# Altium schematic symbol library BOARD_ADS _V2.0 (1).SchLib: 12 symbols
Pins are listed as number, name and electrical type; pins without a type are passive.

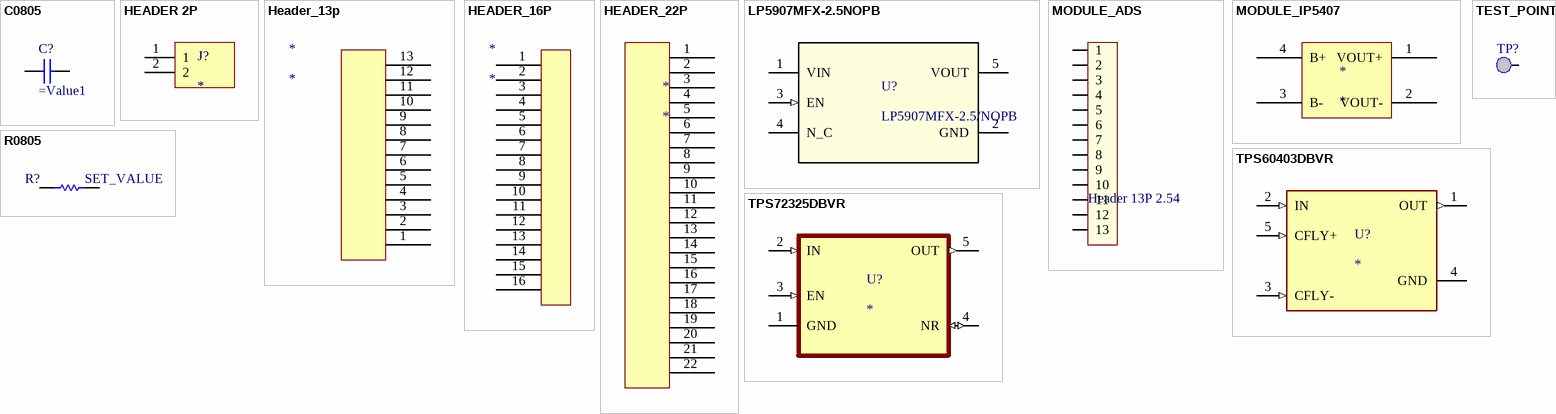
[diagram p0: symbols C0805 to TPS72325DBVR]

## C0805
designator C?
CAP 0402 MLCC NON-POLARIZED GENERIC; VALUE TOLERANCE VOLTAGE AND MPN SET ON INSTANCE; Type: Capacitor; Value2: SET_VOLTAGE; Case: 0402; Package: 0402
footprint C0805L
pins: 1, 2

## HEADER 2P
designator J?
HEADER ASSEMBLY, NARROW, MTA-100, 2 POSITION, STRAIGHT | TE Connectivity 3-644456-2; SnapEDA_Link: https://www.snapeda.com/parts/3-644456-2/TE+Connectivity+AMP+Connectors/view-part/?ref=snap; Package: None; Value: *; MF: TE Connectivity; MP: 3-644456-2; Check_prices: https://www.snapeda.com/parts/3-644456-2/TE+Connectivity+AMP+Connectors/view-part/?ref=eda
footprint HEADER_2P
pins: 1, 2

## Header_13p
designator *
footprint HEADER_13P
pins: 1, 2, 3, 4, 5, 6, 7, 8, 9, 10, 11, 12, 13

## HEADER_16P
designator *
footprint header 16p
pins: 1, 2, 3, 4, 5, 6, 7, 8, 9, 10, 11, 12, 13, 14, 15, 16

## HEADER_22P
designator *
footprint header_22p
pins: 1, 2, 3, 4, 5, 6, 7, 8, 9, 10, 11, 12, 13, 14, 15, 16, 17, 18, 19, 20, 21, 22

## LP5907MFX-2.5NOPB
designator U?, comment LP5907MFX-2.5/NOPB
250-mA, low-noise, high-PSRR, ultra-low-dropout voltage regulator with low IQ and enable 5-SOT-23 -40 to 125; Manufacturer_Name: Texas Instruments; TYPE: TYPE; RefDes: RefDes; Copyright: Copyright (C) 2026 Ultra Librarian. All rights reserved.; Manufacturer_Part_Number: LP5907MFX-2.5/NOPB
footprint DBV0005A_M
pins: 1 VIN (power), 2 GND (power), 3 EN (in), 4 N_C, 5 VOUT (power)

## MODULE_ADS
designator H??, comment Header 13P 2.54
Cắm; Ten_Linh_Kien: Header 10P XH2.54-10P Đực Cong; Don_Vi: Con; Ma_Hang: MH007094; Chung_Loai: Cắm
footprint MODULE ADS1299
pins: 1, 2, 3, 4, 5, 6, 7, 8, 9, 10, 11, 12, 13

## MODULE_IP5407
designator *
footprint MODULE_IP5407
pins: 1 VOUT+, 2 VOUT-, 3 B-, 4 B+

## R0805
designator R?, comment SET_VALUE
RES 0805 GENERIC; VALUE TOLERANCE POWER AND MPN SET ON INSTANCE; Value1: SET_VALUE; Case: 0805; Type: Resistor; Package: 0805
footprint R0805
pins: 1, 2

## TEST_POINT
designator TP?, comment TP_?  (value not drawn)
TP SMD 1P PadDia_1.50mm ROUND COPPER TEST POINT
footprint TP_SMD_1P50 (Single 1.50 mm round top-layer copper test point for probing)
pins: 1 TP

## TPS60403DBVR
designator U?
60mA Charge Pump Voltage Inverter with Fixed 250kHz Operation; MF: Texas Instruments; MP: TPS60403DBVR; SnapEDA_Link: https://www.snapeda.com/parts/TPS60403DBVR/Texas+Instruments/view-part/?ref=snap; Package: SOT-23-5 Texas Instruments; Value: *; Check_prices: https://www.snapeda.com/parts/TPS60403DBVR/Texas+Instruments/view-part/?ref=eda
footprint SOT95P280X145-5N
pins: 1 OUT (out), 2 IN (in), 3 CFLY- (in), 4 GND (power), 5 CFLY+ (in)

## TPS72325DBVR
designator U?
200-mA, negative, adjustable low-dropout voltage regulator with enable; MF: Texas Instruments; MP: TPS72325DBVR; SnapEDA_Link: https://www.snapeda.com/parts/TPS72325DBVR/Texas+Instruments/view-part/?ref=snap; Package: SOT-23-5 Texas Instruments; Value: *; Check_prices: https://www.snapeda.com/parts/TPS72325DBVR/Texas+Instruments/view-part/?ref=eda
footprint SOT95P280X145-5N
pins: 1 GND (power), 2 IN (in), 3 EN (in), 4 NR (io), 5 OUT (out)